# Altium schematic symbol library 2S-Li-ion-Charger.SchLib: 13 symbols
Pins are listed as number, name and electrical type; pins without a type are passive.

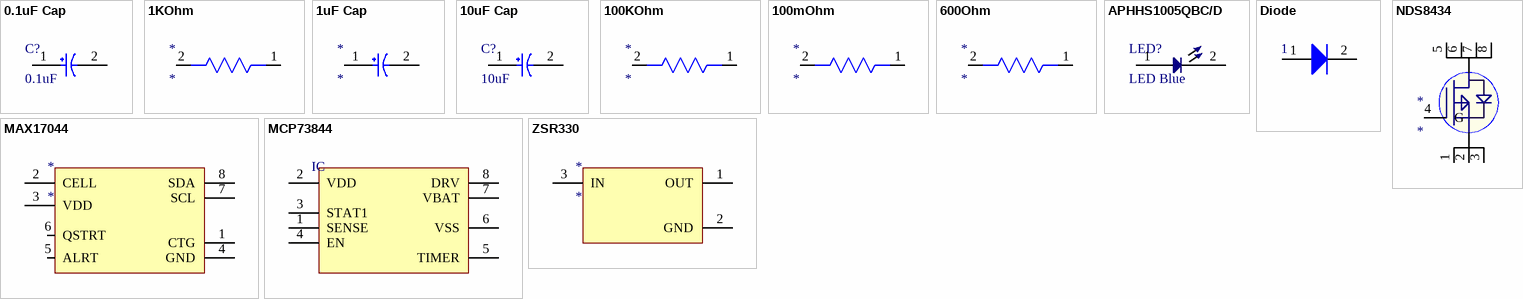
[diagram p0: symbols 0.1uF Cap to ZSR330]

## 0.1uF Cap
designator C?, comment 0.1uF
T491A104K035AT; Manufacturer: Yageo; Manufacturer Part Number: CC0603KRX7R0BB104; Capacitance: 100nF; Voltage Rating: 100V; Tolerance: 10%; Dielectric: X7R; Supplier 1: Digi-Key; RoHS: Yes; Category: Ceramic Capacitors; Stock 1: 60476; Pricing 1: 1=0.19000, 10=0.13500, 50=0.07680, 100=0.06370, 500=0.04466, 1000=0.03696 (USD); Mount: Surface Mount; Case/Package: 0603; Case Code (Metric): 1608; Case Code (Imperial): 0603; Weight: 7.1E-05oz; Min Operating Temperature: -55°C; Max Operating Temperature: 125°C; Package Quantity: 4000; Packaging: Tape and Reel; Termination: SMD/SMT; Resistor Type: Ceramic; Voltage Rating (DC): 100V; Series: CC; Length: 0.063inch; Width: 0.031inch; Thickness: 0.035inch; Depth: 0.8mm; Lead Free: Lead Free; RoHS Compliant: Yes; ComponentLink1URL: https://datasheet.ciiva.com/6277/mlccorderingcode-6277030.pdf?src-supplier=Digi-Key; ComponentLink1Description: https://datasheet.ciiva.com/6277/mlccorderingcode-6277030.pdf?src-supplier=Digi-Key; ComponentLink2URL: https://datasheet.ciiva.com/6277/mlccorderingcode-6277081.pdf?src-supplier=Digi-Key; ComponentLink2Description: https://datasheet.ciiva.com/6277/mlccorderingcode-6277081.pdf?src-supplier=Digi-Key; ComponentLink3URL: https://datasheet.ciiva.com/6277/mlccorderingcode-6277082.pdf?src-supplier=Digi-Key; ComponentLink3Description: https://datasheet.ciiva.com/6277/mlccorderingcode-6277082.pdf?src-supplier=Digi-Key; Supplier Part Number 1: 311-1523-1-ND
footprint Cap-0603
pins: 1, 2

## 1KOhm
designator *
RT0603FRE071KL
footprint Resistor
pins: 1, 2

## 1uF Cap
designator *
T491A105K050AT
pins: 1, 2

## 10uF Cap
designator C?, comment 10uF
T491A106K010AT; Manufacturer: Wurth Electronics; Manufacturer Part Number: 865060643005; Voltage Rating: 50V; Polarity: Polar; Ripple Current: 165mA; Impedance: 1.4R; Life (Hours): 2000Hour; Tolerance: 20%; Supplier 1: Digi-Key; Stock 1: 518; Pricing 1: 1=0.27, 50=0.233, 100=0.203, 250=0.18, 500=0.158 (USD); Mount: Surface Mount; Case/Package: Radial; Min Operating Temperature: -55°C; Max Operating Temperature: 105°C; Package Quantity: 1000; Packaging: Cut Tape; Ripple Current (AC): 165mA; Voltage Rating (DC): 50V; Capacitance: 10uF; Diameter: 6.3mm; Height: 5.5mm; Height - Seated (Max): 0.217inch; REACH SVHC: Unknown; ComponentLink1URL: http://www.farnell.com/datasheets/1880073.pdf?src-supplier=Element14; ComponentLink1Description: http://www.farnell.com/datasheets/1880073.pdf?src-supplier=Element14; ComponentLink2URL: http://www.farnell.com/datasheets/1880073.pdf?src-supplier=Farnell; ComponentLink2Description: http://www.farnell.com/datasheets/1880073.pdf?src-supplier=Farnell; ComponentLink3URL: http://katalog.we-online.de/pbs/datasheet/865060643005.pdf?src-supplier=Digi-Key; ComponentLink3Description: http://katalog.we-online.de/pbs/datasheet/865060643005.pdf?src-supplier=Digi-Key; Supplier Part Number 1: 732-8545-1-ND
footprint 865060643005
pins: 1, 2

## 100KOhm
designator *
RT0603WRE07100KL
pins: 1, 2

## 100mOhm
designator *
PE0402FRF470R1L
pins: 1, 2

## 600Ohm
designator *
CRCW0805600RFKEAHP
pins: 1, 2

## APHHS1005QBC/D
designator LED?, comment LED Blue
LED BLUE CLEAR CHIP SMD 0402; Manufacturer: Kingbright; Manufacturer Part Number: APHHS1005QBC/D; Lens Colour: Colorless; Forward Current: 20mA; Forward Voltage: 3.3V; Power Rating: 120mW; Luminous Intensity: 60mcd; Viewing Angle: 120°; Dominant Wavelength: 465nm; Supplier 1: Digi-Key; Stock 1: 57149; Pricing 1: 1=0.58, 10=0.42, 25=0.3432, 100=0.2746, 250=0.23168, 500=0.19734, 1000=0.15444 (USD); Mount: Surface Mount; Case/Package: 0402; Colour: Blue; Case Code (Metric): 1005; Case Code (Imperial): 0402; Min Operating Temperature: -40°C; Max Operating Temperature: 85°C; Package Quantity: 2000; Illumination Colour: Blue; Packaging: Tape and Reel; Lens Style: Clear; Lens Transparency: Clear; Test Current: 20mA; Length: 1mm; Height: 0.6mm; Width: 0.5mm; Lead Free: Lead Free; ComponentLink1URL: http://www.mouser.com/ds/2/216/APHHS1005QBC-D-54846.pdf; ComponentLink1Description: http://www.mouser.com/ds/2/216/APHHS1005QBC-D-54846.pdf; ComponentLink2URL: http://www.kingbrightusa.com/images/catalog/SPEC/APHHS1005QBC-D.pdf; ComponentLink2Description: http://www.kingbrightusa.com/images/catalog/SPEC/APHHS1005QBC-D.pdf; Supplier Part Number 1: 754-1504-1-ND
footprint led
pins: 1, 2

## Diode
designator 1
Default Diode; Published: 8-Jun-2000; LatestRevisionDate: 17-Jul-2002; LatestRevisionNote: Re-released for DXP Platform.; PackageVersion: Sep-1996; PackageReference: SMC; Publisher: Altium Limited; PackageDescription: DO-214-AB/SMC; 2 C-Bend Leads; Body 7.9 x 5.9 mm, inc. leads (LxW); Code_JEDEC: DO-214-AB
footprint SMC (DO-214-AB/SMC; 2 C-Bend Leads; Body 7.9 x 5.9 mm, inc. leads (LxW))
simulation model DIODE (Diode)
signal-integrity model Diode
pins: 1 A, 2 K

## MAX17044
designator *
pins: 1 CTG, 2 CELL, 3 VDD, 4 GND, 5 ALRT, 6 QSTRT, 7 SCL, 8 SDA

## MCP73844
designator IC
pins: 1 SENSE, 2 VDD, 3 STAT1, 4 EN, 5 TIMER, 6 VSS, 7 VBAT, 8 DRV

## NDS8434
designator *
P-Channel
pins: 1 S, 2 S, 3 S, 4 G, 5 D, 6 D, 7 D, 8 D

## ZSR330
designator *
ZSR330_SOT223
pins: 1 OUT, 2 GND, 3 IN